# Altium footprint library custom-case.PcbLib: 342 footprints (part 21 of 22)
Each footprint in its own frame and in the unit in brackets; x right, y up, seen from the top. Pads: shape width x height; smd on the part's side, far side on the other; paste and mask are expansions set on the pad; w line width, h text height; cw(c..) or ccw(c..) is an arc to the next point about the centre after c.
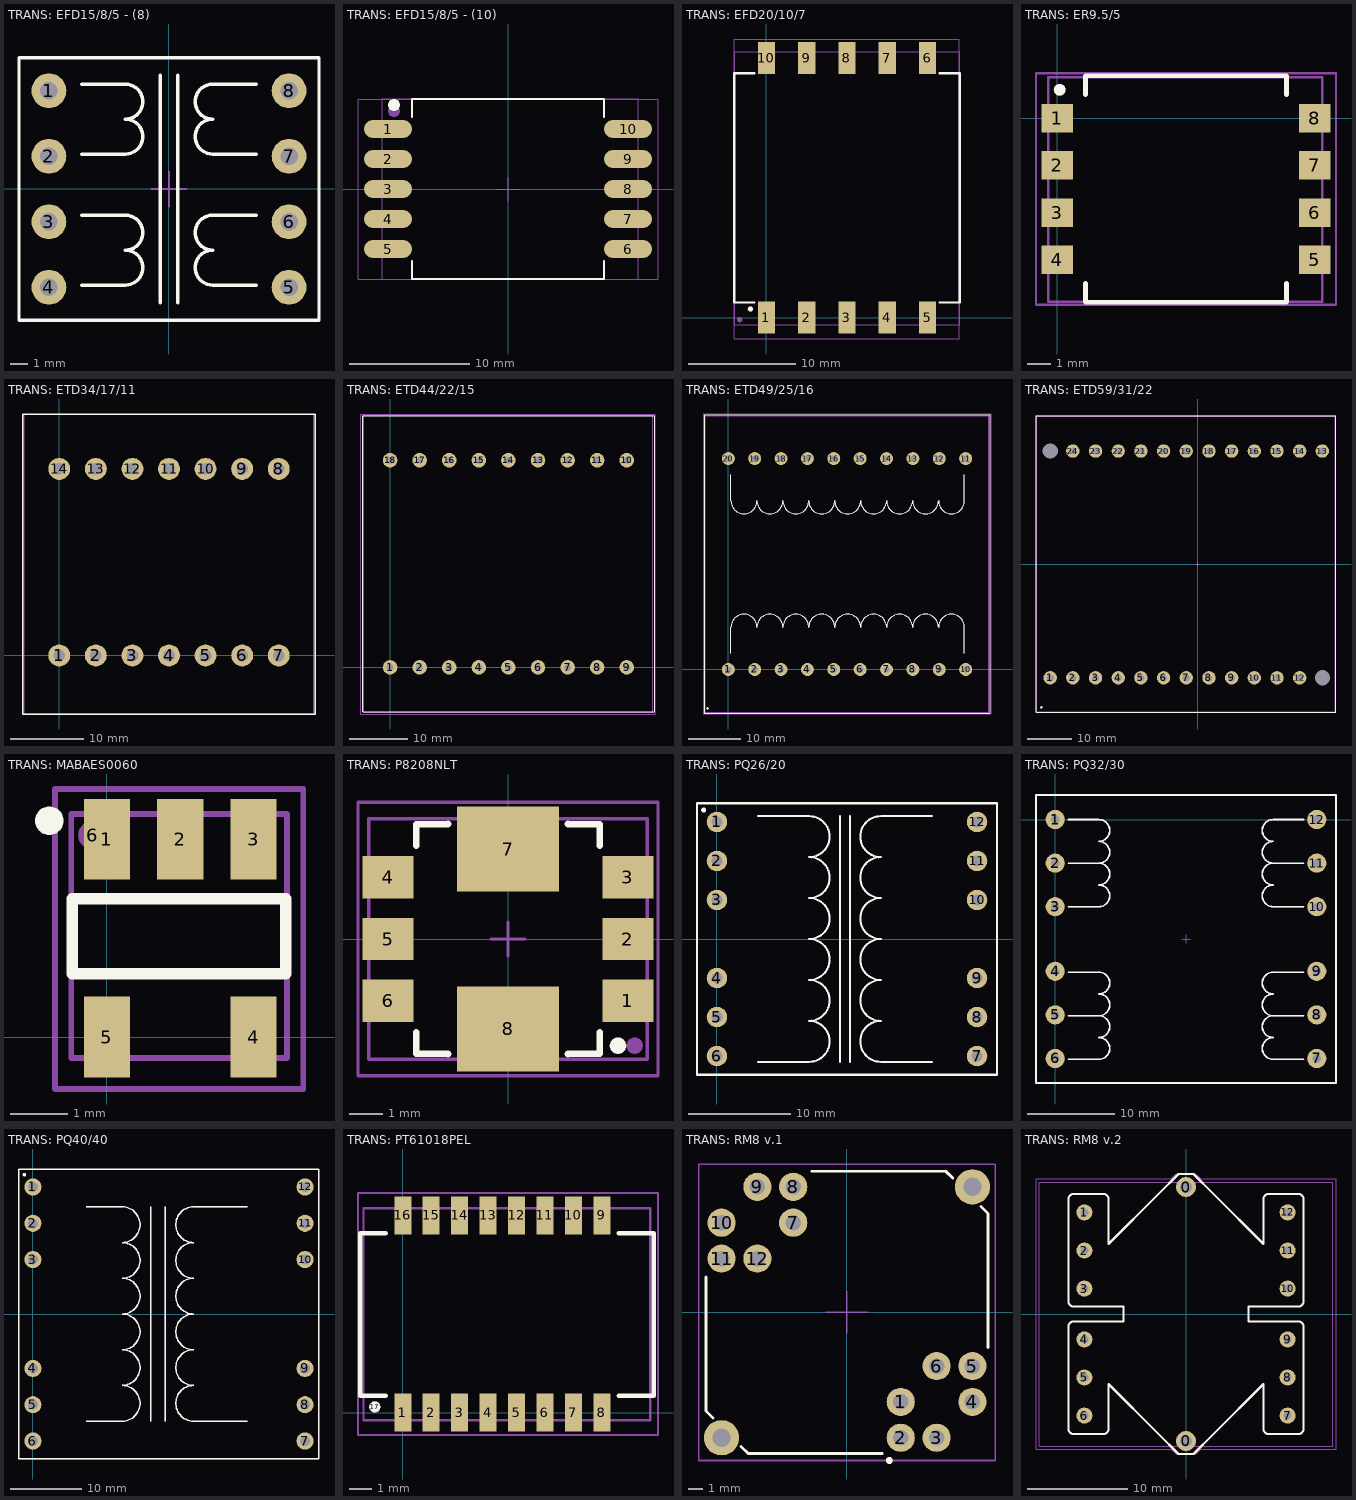
[diagram p20: the footprints below, top view; thin cyan lines are the x and y axes]

## TRANS: EFD15/8/5 - (8) [mm]
pads (8):
  round 2 hole 1: 1(-6.875,5.625) 2(-6.875,1.875) 3(-6.875,-1.875) 4(-6.875,-5.625) 5(6.875,-5.625) 6(6.875,-1.875) 7(6.875,1.875) 8(6.875,5.625)
Top Overlay:
  lines w0.2: -5,-5.5 -2.5,-5.5 ccw(c-2.5,-4.5) -2.5,-3.5 ccw(c-2.5,-2.5) -2.5,-1.5 -5,-1.5 ; -5,2 -2.5,2 ccw(c-2.5,3) -2.5,4 ccw(c-2.5,5) -2.5,6 -5,6 ; -0.5,-6.5 -0.5,6.5 ; 0.5,-6.5 0.5,6.5 ; 5,-5.5 2.5,-5.5 cw(c2.5,-4.5) 2.5,-3.5 cw(c2.5,-2.5) 2.5,-1.5 5,-1.5 ; 5,2 2.5,2 cw(c2.5,3) 2.5,4 cw(c2.5,5) 2.5,6 5,6 ; -8.587,-7.5 -8.587,7.5 8.588,7.5 8.588,-7.5 -8.587,-7.5
Top Assy:
  lines w0.1: -8.587,-7.5 -8.587,7.5 8.588,7.5 8.588,-7.5 -8.587,-7.5
Size Area:
  lines w0.1: -1,0 1,0 ; 0,-1 0,1 ; -8.587,-7.5 -8.587,7.5 8.588,7.5 8.588,-7.5 -8.587,-7.5
3D body "999.STEP": height 8.41, standoff -3.1, extent -8.587,-7.5 8.588,7.5
3D body: height 0.25, standoff 0, extent -7.5,15 -7.5,15

## TRANS: EFD15/8/5 - (10) [mm]
pads (12):
  rrect100% 4x1.5 smd: 1(-10,5) 2(-10,2.5) 3(-10,0) 4(-10,-2.5) 5(-10,-5) 6(10,-5) 7(10,-2.5) 8(10,0) 9(10,2.5) 10(10,5)
  round 1 on Mech1: ""(-9.5,6.5)
  round 1 on Top Overlay: ""(-9.5,7)
Top Overlay:
  lines w0.2: -8,-6 -8,-7.5 8,-7.5 8,-6 ; -8,6 -8,7.5 8,7.5 8,6
Top Assy:
  lines w0.1: -10.5,-7.5 10.85,-7.5 10.85,7.5 -10.5,7.5 -10.5,-7.5
Size Area:
  lines w0.1: -1,0 1,0 ; 0,-1 0,1 ; -12.5,-7.5 -12.5,7.5 12.5,7.5 12.5,-7.5 -12.5,-7.5
3D body "EFD15.STEP": height 8.15, standoff -0.05, extent -10.5,-7.5 10.85,7.5
3D body: height 0.25, standoff 0, extent -7.5,15 -7.5,15

## TRANS: EFD20/10/7 [mm]
pads (12):
  rect 1.6x3 smd: 1(0,0) 2(3.76,0) 3(7.52,0) 4(11.28,0) 5(15.04,0) 6(15.04,24.22) 7(11.28,24.22) 8(7.52,24.22) 9(3.76,24.22) 10(0,24.22)
  round 0.5 on Mech1: ""(-2.5,-0.2)
  round 0.5 on Top Overlay: ""(-1.5,0.8)
Top Overlay:
  lines w0.2: -1.1,1.4 -3,1.4 -3,22.8 -1.1,22.8 ; 16.14,1.4 18.04,1.4 18.04,22.8 16.14,22.8
Top Assy:
  lines w0.1: -2.96,-0.685 18.04,-0.685 18.04,24.815 -2.96,24.815 -2.96,-0.685
Size Area:
  lines w0.1: -3,-2 18,-2 18,26 -3,26 -3,-2
3D body "EFD20 SMD.STEP": height 10.41, standoff 0, extent -3.06,-0.685 17.94,24.815

## TRANS: ER9.5/5 [mm]
pads (10):
  rect 1.35x1.2 smd: 1(0,0) 2(0,-2) 3(0,-4) 4(0,-6) 5(10.9,-6) 6(10.9,-4) 7(10.9,-2) 8(10.9,0)
  round 0.5 on Top Overlay: ""(0.1,1.2)
  round 0.5 on Mech1: ""(0.1,1.2)
Top Overlay:
  lines w0.2: 1.2,-7 1.2,-7.8 9.7,-7.8 9.7,-7 ; 1.2,1 1.2,1.8 9.7,1.8 9.7,1
Top Assy:
  lines w0.1: -0.387,-7.77 11.213,-7.77 11.213,1.73 -0.387,1.73 -0.387,-7.77
Size Area:
  lines w0.1: -0.9,-7.9 -0.9,1.9 11.8,1.9 11.8,-7.9 -0.9,-7.9
3D body "1.STEP": height 5.2, standoff -0.05, extent -0.387,-7.77 11.213,1.73

## TRANS: ETD34/17/11 [mm]
pads (14):
  round 3 hole 1.6: 1(0,0) 2(5,0) 3(10,0) 4(15,0) 5(20,0) 6(25,0) 7(30,0) 8(30,25.5) 9(25,25.5) 10(20,25.5) 11(15,25.5) 12(10,25.5) 13(5,25.5) 14(0,25.5)
Top Overlay:
  lines w0.2: -5,-8 -5,33 35,33 35,-8 -5,-8
Top Assy:
  lines w0.1: -4.8,-8 -4.8,33 34.8,33 34.8,-8 -4.8,-8
Size Area:
  lines w0.1: -5,-8 35,-8 35,33 -5,33 -5,-8
3D body "User Library-ETD34.STEP": height 32.9, standoff -2.44, extent -4.8,-8 34.8,33

## TRANS: ETD44/22/15 [mm]
pads (18):
  round 2.5 hole 1.2: 1(0,0) 2(5.08,0) 3(10.16,0) 4(15.24,0) 5(20.32,0) 6(25.4,0) 7(30.48,0) 8(35.56,0) 9(40.64,0) 10(40.64,35.56) 11(35.56,35.56) 12(30.48,35.56) 13(25.4,35.56) 14(20.32,35.56) 15(15.24,35.56) 16(10.16,35.56) 17(5.08,35.56) 18(0,35.56)
Top Overlay:
  lines w0.2: -4.7,-7.62 45.4,-7.62 45.4,43.18 -4.7,43.18 -4.7,-7.62
Top Assy:
  lines w0.1: -4.48,-7.72 45.12,-7.72 45.12,43.28 -4.48,43.28 -4.48,-7.72
Size Area:
  lines w0.1: -5,-8 -5,43.5 45.5,43.5 45.5,-8 -5,-8
3D body "User Library-ETD44.STEP": height 38.1, standoff -4.5, extent -4.48,-7.72 45.12,43.28

## TRANS: ETD49/25/16 [mm]
pads (21):
  round 2.5 hole 1.2: 1(0,0) 2(5.08,0) 3(10.16,0) 4(15.24,0) 5(20.32,0) 6(25.4,0) 7(30.48,0) 8(35.56,0) 9(40.64,0) 10(45.72,0) 11(45.72,40.64) 12(40.64,40.64) 13(35.56,40.64) 14(30.48,40.64) 15(25.4,40.64) 16(20.32,40.64) 17(15.24,40.64) 18(10.16,40.64) 19(5.08,40.64) 20(0,40.64)
  round 0.5 on Top Overlay: ""(-4,-7.5)
Top Overlay:
  lines w0.2: 0.5,3.14 0.5,8.14 cw(c3,8.14) 5.5,8.14 cw(c8,8.14) 10.5,8.14 cw(c13,8.14) 15.5,8.14 cw(c18,8.14) 20.5,8.14 cw(c23,8.14) 25.5,8.14 cw(c28,8.14) 30.5,8.14 cw(c33,8.14) 35.5,8.14 cw(c38,8.14) 40.5,8.14 cw(c43,8.14) 45.5,8.14 45.5,3.14 ; 0.5,37.5 0.5,32.5 ccw(c3,32.5) 5.5,32.5 ccw(c8,32.5) 10.5,32.5 ccw(c13,32.5) 15.5,32.5 ccw(c18,32.5) 20.5,32.5 ccw(c23,32.5) 25.5,32.5 ccw(c28,32.5) 30.5,32.5 ccw(c33,32.5) 35.5,32.5 ccw(c38,32.5) 40.5,32.5 ccw(c43,32.5) 45.5,32.5 45.5,37.5 ; -4.65,-8.425 -4.65,49.075 50.375,49.075 50.375,-8.425 -4.65,-8.425
Top Assy:
  lines w0.1: 0.5,3.14 0.5,8.14 cw(c3,8.14) 5.5,8.14 cw(c8,8.14) 10.5,8.14 cw(c13,8.14) 15.5,8.14 cw(c18,8.14) 20.5,8.14 cw(c23,8.14) 25.5,8.14 cw(c28,8.14) 30.5,8.14 cw(c33,8.14) 35.5,8.14 cw(c38,8.14) 40.5,8.14 cw(c43,8.14) 45.5,8.14 45.5,3.14 ; 0.5,37.5 0.5,32.5 ccw(c3,32.5) 5.5,32.5 ccw(c8,32.5) 10.5,32.5 ccw(c13,32.5) 15.5,32.5 ccw(c18,32.5) 20.5,32.5 ccw(c23,32.5) 25.5,32.5 ccw(c28,32.5) 30.5,32.5 ccw(c33,32.5) 35.5,32.5 ccw(c38,32.5) 40.5,32.5 ccw(c43,32.5) 45.5,32.5 45.5,37.5 ; -4.49,-8.28 -4.49,48.92 50.21,48.92 50.21,-8.28 -4.49,-8.28
Size Area:
  lines w0.1: -4.8,-8.575 50.525,-8.575 50.525,49.225 -4.8,49.225 -4.8,-8.575
3D body "222.STEP": height 41, standoff -3.86, extent -4.49,-8.28 50.21,48.92

## TRANS: ETD59/31/22 [mm]
pads (28):
  round 0.5 on Mech1: 1(-35,-32)
  round 0.5 on Top Overlay: 1(-35,-32)
  round 3 hole 1.6: 1(-33.02,-25.4) 2(-27.94,-25.4) 3(-22.86,-25.4) 4(-17.78,-25.4) 5(-12.7,-25.4) 6(-7.62,-25.4) 7(-2.54,-25.4) 8(2.54,-25.4) 9(7.62,-25.4) 10(12.7,-25.4) 11(17.78,-25.4) 12(22.86,-25.4) 13(27.94,25.4) 14(22.86,25.4) 15(17.78,25.4) 16(12.7,25.4) 17(7.62,25.4) 18(2.54,25.4) 19(-2.54,25.4) 20(-7.62,25.4) 21(-12.7,25.4) 22(-17.78,25.4) 23(-22.86,25.4) 24(-27.94,25.4)
  round 3 hole 3.4: ""(-33.02,25.4) ""(27.94,-25.4)
Top Overlay:
  lines w0.2: -36.2,-33.1 31,-33.1 31,33.3 -36.2,33.3 -36.2,-33.1
Top Assy:
  lines w0.1: -36.04,33.146 30.86,33.146 30.86,-32.953 -36.04,-32.953 -36.04,33.107 -36,33.146
Size Area:
  lines w0.1: -0.5,0 0.5,0 ; 0,-0.5 0,0.5 ; -36.2,-33.1 31,-33.1 31,33.3 -36.2,33.3 -36.2,-33.1
3D body "ETD59-31-22.STEP": height 51.38, standoff -1.62, extent -36.039,-32.953 30.86,33.146

## TRANS: MABAES0060 [mm]
pads (7):
  rect 0.8x1.4 smd: 1(0,3.43) 2(1.27,3.43) 3(2.54,3.43) 4(2.54,0) 5(0,0)
  round 0.5 on Mech1: 6(-0.25,3.5)
  round 0.5 on Top Overlay: ""(-1,3.75)
Top Overlay:
  lines w0.2: -0.6,1.1 3.1,1.1 3.1,2.4 -0.6,2.4 -0.6,1.1
Top Assy:
  lines w0.1: -0.62,-0.365 -0.62,3.865 3.12,3.865 3.12,-0.365 -0.62,-0.365
Size Area:
  lines w0.1: -0.9,-0.9 3.4,-0.9 3.4,4.3 -0.9,4.3 -0.9,-0.9
3D body "User Library-FluxBalun.STEP": height -1, standoff -4.55, extent -0.62,-0.365 3.12,3.865

## TRANS: P8208NLT [mm]
pads (10):
  rect 1.52x1.27 smd: 1(3.6,-1.85) 2(3.6,0) 3(3.6,1.85) 4(-3.6,1.85) 5(-3.6,0) 6(-3.6,-1.85)
  rect 3.05x2.54 smd: 7(0,2.7) 8(0,-2.7)
  round 0.5 on Top Overlay: ""(3.3,-3.2)
  round 0.5 on Mech1: ""(3.8,-3.2)
Top Overlay:
  lines w0.2: -2.75,-2.8 -2.75,-3.445 -1.8,-3.45 ; -2.75,2.8 -2.75,3.445 -1.8,3.45 ; 1.8,-3.45 2.75,-3.445 2.75,-2.8 ; 1.8,3.45 2.75,3.445 2.75,2.8
Top Assy:
  lines w0.1: -4.175,-3.605 4.175,-3.605 4.175,3.605 -4.175,3.605 -4.175,-3.605
Size Area:
  lines w0.1: -0.5,0 0.5,0 ; 0,-0.5 0,0.5 ; -4.5,-4.1 -4.5,4.1 4.5,4.1 4.5,-4.1 -4.5,-4.1
3D body "CurrentTrans v3.step": height 5.5, standoff 0, extent -4.175,-3.605 4.175,3.605

## TRANS: PQ26/20 [mm]
pads (13):
  round 2 hole 1.1: 1(0,11.43) 2(0,7.62) 3(0,3.81) 4(0,-3.81) 5(0,-7.62) 6(0,-11.43) 7(25.4,-11.43) 8(25.4,-7.62) 9(25.4,-3.81) 10(25.4,3.81) 11(25.4,7.62) 12(25.4,11.43)
  round 0.5 on Top Overlay: ""(-1.3,12.6)
Top Overlay:
  lines w0.2: 4,-12 9,-12 ccw(c9,-10) 9,-8 ccw(c9,-6) 9,-4 ccw(c9,-2) 9,0 ccw(c9,2) 9,4 ccw(c9,6) 9,8 ccw(c9,10) 9,12 4,12 ; 12,-12 12,12 ; 13,-12 13,12 ; 21,-12 16,-12 cw(c16,-10) 16,-8 cw(c16,-6) 16,-4 cw(c16,-2) 16,0 cw(c16,2) 16,4 cw(c16,6) 16,8 cw(c16,10) 16,12 21,12 ; -1.95,-13.26 27.35,-13.26 27.35,13.26 -1.95,13.26 -1.95,-13.26
Top Assy:
  lines w0.1: 4,-12 9,-12 ccw(c9,-10) 9,-8 ccw(c9,-6) 9,-4 ccw(c9,-2) 9,0 ccw(c9,2) 9,4 ccw(c9,6) 9,8 ccw(c9,10) 9,12 4,12 ; 12,-12 12,12 ; 13,-12 13,12 ; 21,-12 16,-12 cw(c16,-10) 16,-8 cw(c16,-6) 16,-4 cw(c16,-2) 16,0 cw(c16,2) 16,4 cw(c16,6) 16,8 cw(c16,10) 16,12 21,12 ; -1.95,-13.26 27.35,-13.26 27.35,13.26 -1.95,13.26 -1.95,-13.26
Size Area:
  lines w0.1: -1.95,-13.26 27.35,-13.26 27.35,13.26 -1.95,13.26 -1.95,-13.26
3D body "EPCOS_pq2620.step": height 25.1, standoff -3.6, extent -1.95,-13.26 27.35,13.26

## TRANS: PQ32/30 [mm]
pads (12):
  round 2.2 hole 1 mask+0.075: 1(0,0) 2(0,-5) 3(0,-10) 4(0,-17.4) 5(0,-22.4) 6(0,-27.4) 7(30,-27.4) 8(30,-22.4) 9(30,-17.4) 10(30,-10) 11(30,-5) 12(30,0)
Top Overlay:
  lines w0.2: 1.5,-27.5 5,-27.5 ccw(c5,-26.25) 5,-25 ccw(c5,-23.75) 5,-22.5 ; 1.5,-22.5 5,-22.5 ; 1.5,-17.5 5,-17.5 cw(c5,-18.75) 5,-20 cw(c5,-21.25) 5,-22.5 ; 1.5,-10 5,-10 ccw(c5,-8.75) 5,-7.5 ccw(c5,-6.25) 5,-5 ; 1.5,-5 5,-5 ; 1.5,0 5,0 cw(c5,-1.25) 5,-2.5 cw(c5,-3.75) 5,-5 ; 28.5,-27.5 25,-27.5 cw(c25,-26.25) 25,-25 cw(c25,-23.75) 25,-22.5 ; 28.5,-22.5 25,-22.5 ; 28.5,-17.5 25,-17.5 ccw(c25,-18.75) 25,-20 ccw(c25,-21.25) 25,-22.5 ; 28.5,-10 25,-10 cw(c25,-8.75) 25,-7.5 cw(c25,-6.25) 25,-5 ; 28.5,-5 25,-5 ; 28.5,0 25,0 ccw(c25,-1.25) 25,-2.5 ccw(c25,-3.75) 25,-5 ; -2.2,-30.2 32.2,-30.2 32.2,2.8 -2.2,2.8 -2.2,-30.2
Top Assy:
  lines w0.1: 1.5,-27.5 5,-27.5 ccw(c5,-26.25) 5,-25 ccw(c5,-23.75) 5,-22.5 ; 1.5,-22.5 5,-22.5 ; 1.5,-17.5 5,-17.5 cw(c5,-18.75) 5,-20 cw(c5,-21.25) 5,-22.5 ; 1.5,-10 5,-10 ccw(c5,-8.75) 5,-7.5 ccw(c5,-6.25) 5,-5 ; 1.5,-5 5,-5 ; 1.5,0 5,0 cw(c5,-1.25) 5,-2.5 cw(c5,-3.75) 5,-5 ; 28.5,-27.5 25,-27.5 cw(c25,-26.25) 25,-25 cw(c25,-23.75) 25,-22.5 ; 28.5,-22.5 25,-22.5 ; 28.5,-17.5 25,-17.5 ccw(c25,-18.75) 25,-20 ccw(c25,-21.25) 25,-22.5 ; 28.5,-10 25,-10 cw(c25,-8.75) 25,-7.5 cw(c25,-6.25) 25,-5 ; 28.5,-5 25,-5 ; 28.5,0 25,0 ccw(c25,-1.25) 25,-2.5 ccw(c25,-3.75) 25,-5 ; -2.2,-30.2 -2.2,2.8 32.2,2.8 32.2,-30.2 -2.2,-30.2
Size Area:
  lines w0.1: 14.5,-13.7 15,-13.7 ; 15,-14.2 15,-13.7 ; 15,-13.2 15,-13.7 ; 15.5,-13.7 15,-13.7 ; -2.2,-30.2 32.2,-30.2 32.2,2.8 -2.2,2.8 -2.2,-30.2
3D body "User Library-PQ 32_30.STEP": height 32.9, standoff -4.9, extent -2.2,-30.2 32.2,2.8

## TRANS: PQ40/40 [mm]
pads (13):
  round 2.4 hole 1.4: 1(0,17.78) 2(0,12.7) 3(0,7.62) 4(0,-7.62) 5(0,-12.7) 6(0,-17.78) 7(38.1,-17.78) 8(38.1,-12.7) 9(38.1,-7.62) 10(38.1,7.62) 11(38.1,12.7) 12(38.1,17.78)
  round 0.5 on Top Overlay: ""(-1.2,19.5)
Top Overlay:
  lines w0.2: 7.5,-15 12.5,-15 ccw(c12.5,-12.5) 12.5,-10 ccw(c12.5,-7.5) 12.5,-5 ccw(c12.5,-2.5) 12.5,0 ccw(c12.5,2.5) 12.5,5 ccw(c12.5,7.5) 12.5,10 ccw(c12.5,12.5) 12.5,15 7.5,15 ; 16.5,-15 16.5,15 ; 18.5,-15 18.5,15 ; 30,-15 22.5,-15 cw(c22.5,-12.5) 22.5,-10 cw(c22.5,-7.5) 22.5,-5 cw(c22.5,-2.5) 22.5,0 cw(c22.5,2.5) 22.5,5 cw(c22.5,7.5) 22.5,10 cw(c22.5,12.5) 22.5,15 30,15 ; -1.95,-20.251 -1.95,20.251 40.05,20.251 40.05,-20.251 -1.95,-20.251
Top Assy:
  lines w0.1: 7.5,-15 12.5,-15 ccw(c12.5,-12.5) 12.5,-10 ccw(c12.5,-7.5) 12.5,-5 ccw(c12.5,-2.5) 12.5,0 ccw(c12.5,2.5) 12.5,5 ccw(c12.5,7.5) 12.5,10 ccw(c12.5,12.5) 12.5,15 7.5,15 ; 16.5,-15 16.5,15 ; 18.5,-15 18.5,15 ; 30,-15 22.5,-15 cw(c22.5,-12.5) 22.5,-10 cw(c22.5,-7.5) 22.5,-5 cw(c22.5,-2.5) 22.5,0 cw(c22.5,2.5) 22.5,5 cw(c22.5,7.5) 22.5,10 cw(c22.5,12.5) 22.5,15 30,15 ; -1.95,-20.251 -1.95,20.251 40.05,20.251 40.05,-20.251 -1.95,-20.251
Size Area:
  lines w0.1: -1.95,-20.251 -1.95,20.251 40.05,20.251 40.05,-20.251 -1.95,-20.251
3D body "40 v10.step": height 45.2, standoff -3.4, extent -1.95,-20.251 40.05,20.251

## TRANS: PT61018PEL [mm]
pads (18):
  rect 0.76x1.7 smd: 1(0,0) 2(1.27,0) 3(2.54,0) 4(3.81,0) 5(5.08,0) 6(6.35,0) 7(7.62,0) 8(8.89,0) 9(8.89,8.8) 10(7.62,8.8) 11(6.35,8.8) 12(5.08,8.8) 13(3.81,8.8) 14(2.54,8.8) 15(1.27,8.8) 16(0,8.8)
  round 0.5 on Mech1: 17(-1.25,0.25)
  round 0.5 on Top Overlay: ""(-1.25,0.25)
Top Overlay:
  lines w0.2: -0.75,0.75 -1.9,0.75 -1.9,8 -0.75,8 ; 9.65,0.75 11.2,0.75 11.2,8 9.65,8
Top Assy:
  lines w0.1: -1.75,-0.35 -1.75,9.128 11.05,9.128 11.05,-0.35 -1.75,-0.35
Size Area:
  lines w0.1: -2,-1 11.4,-1 11.4,9.8 -2,9.8 -2,-1
3D body "PT61018PEL.stp": height 6.01, standoff -0.04, extent -1.75,-0.35 11.05,9.128

## TRANS: RM8 v.1 [mm]
pads (15):
  round 2 hole 1.1: 1(3.81,-6.35) 2(3.81,-8.89) 3(6.35,-8.89) 4(8.89,-6.35) 5(8.89,-3.81) 6(6.35,-3.81) 7(-3.81,6.35) 8(-3.81,8.89) 9(-6.35,8.89) 10(-8.89,6.35) 11(-8.89,3.81) 12(-6.35,3.81)
  round 2.5 hole 1.3: ""(-8.89,-8.89) ""(8.89,8.89)
  round 0.5 on Top Overlay: ""(3,-10.5)
Top Overlay:
  lines w0.2: -10,2.5 -10,-7 ; -9.5,-7.5 -10,-7 ; -7.5,-9.5 -7,-10 ; -2.5,10 7,10 ; 2.5,-10 -7,-10 ; 7.5,9.5 7,10 ; 9.5,7.5 10,7 ; 10,-2.5 10,7 ; -10,-7 -10,-7 ; -7,-10 -7,-10 ; 7,10 7,10 ; 10,7 10,7
Top Assy:
  lines w0.1: -10.51,-10.51 10.511,-10.51 10.511,10.51 -10.51,10.51 -10.51,-10.51
Size Area:
  lines w0.1: -1.5,0 1.5,0 ; 0,-1.5 0,1.5 ; -10.5,-10.5 10.5,-10.5 10.5,10.5 -10.5,10.5 -10.5,-10.5
3D body "User Library-RM8.STEP": height 16.45, standoff -3.37, extent -10.51,-10.51 10.511,10.51

## TRANS: RM8 v.2 [mm]
pads (14):
  round 2 hole 1.2: 0(0,-12.7) 0(0,12.7)
  round 1.6 hole 0.8: 1(-10.16,10.16) 2(-10.16,6.35) 3(-10.16,2.54) 4(-10.16,-2.54) 5(-10.16,-6.35) 6(-10.16,-10.16) 7(10.16,-10.16) 8(10.16,-6.35) 9(10.16,-2.54) 10(10.16,2.54) 11(10.16,6.35) 12(10.16,10.16)
Top Overlay:
  lines w0.2: -11.75,-11.5 ccw(c-11.25,-11.5) -11.25,-12 -8.25,-12 ccw(c-8.25,-11.5) -7.75,-11.5 -7.75,-7 -2.71,-12.04 -0.75,-14 0,-14 0.75,-14 2.71,-12.04 7.75,-7 7.75,-11.5 ccw(c8.25,-11.5) 8.25,-12 11.25,-12 ccw(c11.25,-11.5) 11.75,-11.5 11.75,-1.25 ccw(c11.25,-1.25) 11.25,-0.75 6.25,-0.75 6.25,0.75 11.25,0.75 ccw(c11.25,1.25) 11.75,1.25 11.75,11.5 ccw(c11.25,11.5) 11.25,12 8.25,12 ccw(c8.25,11.5) 7.75,11.5 7.75,7 2.71,12.04 0.75,14 0,14 -0.75,14 -2.71,12.04 -7.75,7 -7.75,11.5 ccw(c-8.25,11.5) -8.25,12 -11.25,12 ccw(c-11.25,11.5) -11.75,11.5 -11.75,1.25 ccw(c-11.25,1.25) -11.25,0.75 -6.25,0.75 -6.25,-0.75 -11.25,-0.75 ccw(c-11.25,-1.25) -11.75,-1.25 -11.75,-11.5
Top Assy:
  lines w0.1: -14.7,-13.215 14.7,-13.215 14.7,13.196 -14.7,13.196 -14.7,-13.215
Size Area:
  lines w0.1: -15,-13.5 -15,13.5 -1.5,13.5 -1,14 -0.5,14 1,14 1.5,13.5 15,13.5 15,-13.5 1.5,-13.5 1,-14 0.25,-14 -1,-14 -1.5,-13.5 -15,-13.5
3D body "User Library-RM8 transformer.STEP": height 16.5, standoff -4.45, extent -14.7,-13.215 14.7,13.196